# Altium footprint library PcbLib1.PcbLib: 335 footprints (part 6 of 22)
Each footprint in its own frame and in the unit in brackets; x right, y up, seen from the top. Pads: shape width x height; smd on the part's side, far side on the other; paste and mask are expansions set on the pad; w line width, h text height; cw(c..) or ccw(c..) is an arc to the next point about the centre after c.
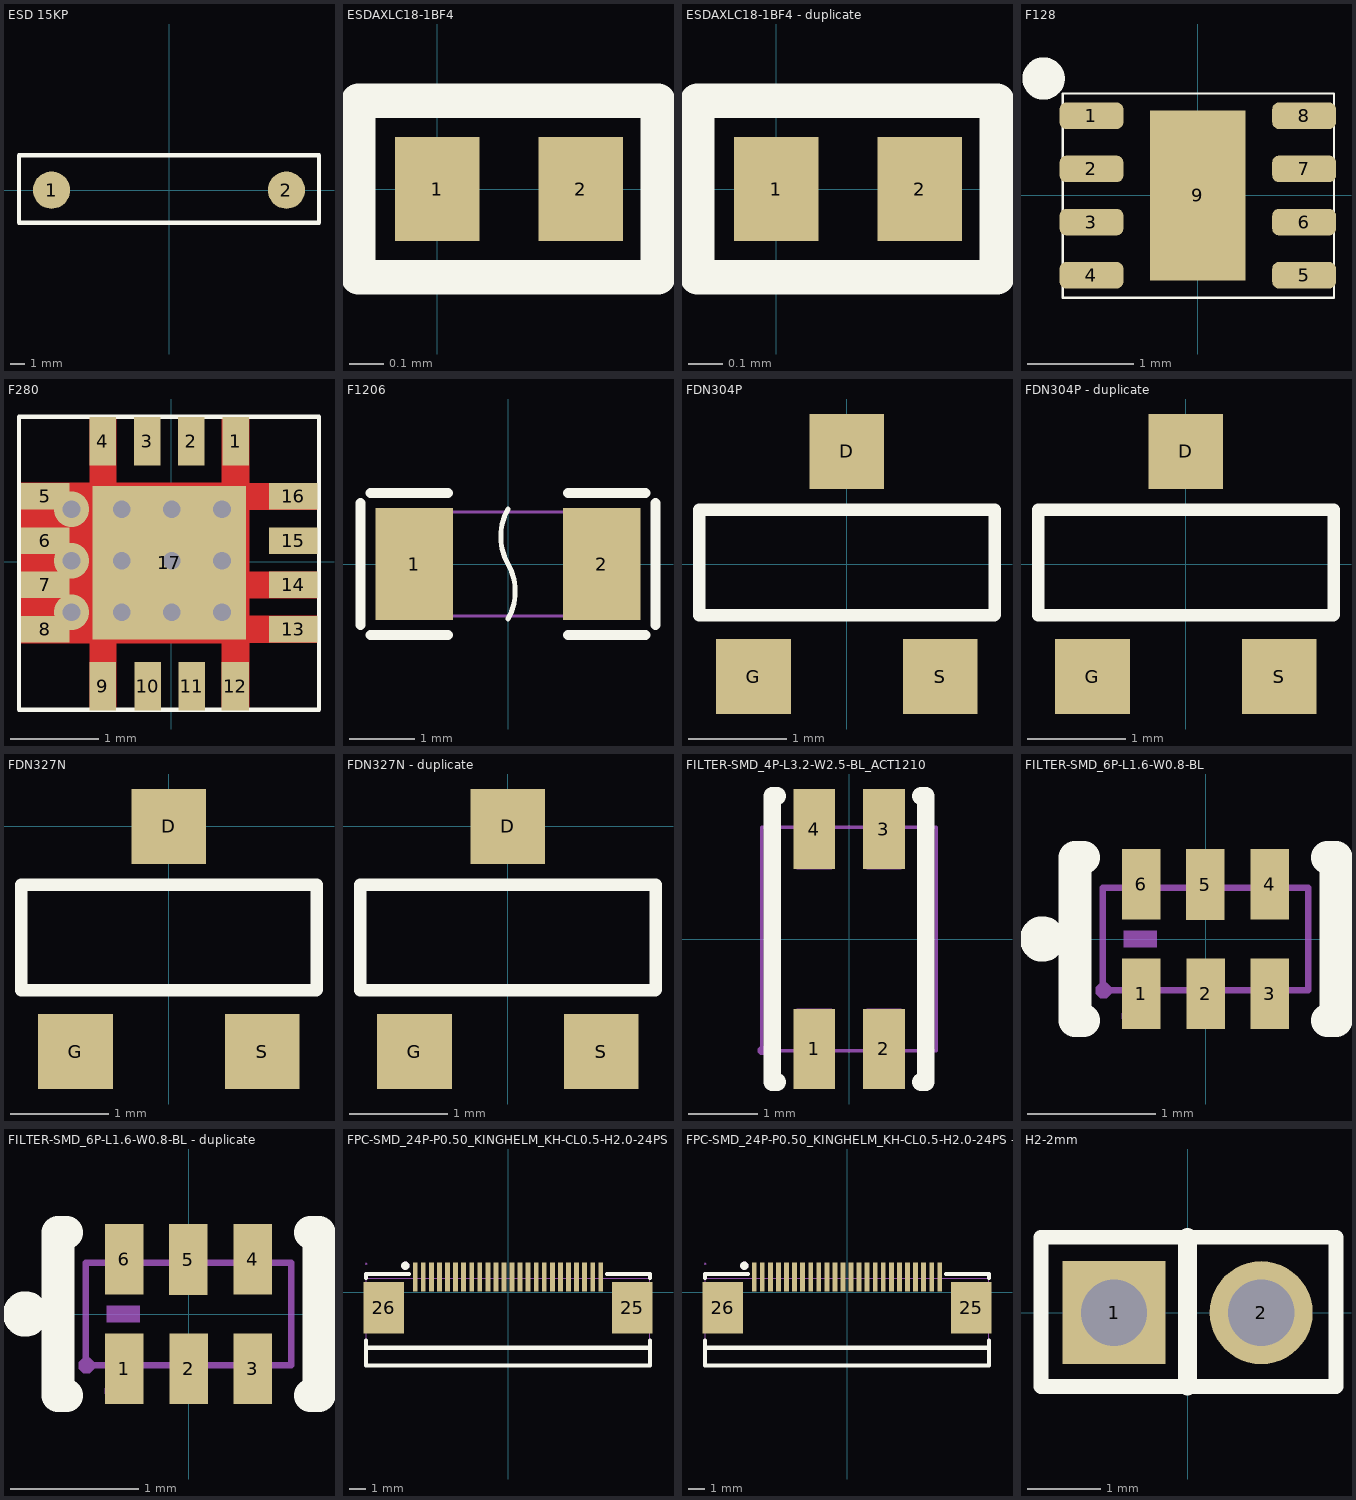
[diagram p5: the footprints below, top view; thin cyan lines are the x and y axes]

## ESD 15KP [mm]
pads (2):
  round 2.5 smd: 1(-7.875,0) 2(7.875,0)
Top Overlay:
  lines w0.3: -10.058,-2.184 -10.058,2.337 10.058,2.337 10.058,-2.184 -10.058,-2.184

## ESDAXLC18-1BF4 [mm]
pads (2):
  rect 0.243x0.3 smd: 1(0,0) 2(0.413,0)
Top Overlay:
  lines w0.1: -0.229,-0.254 -0.229,0.254 0.635,0.254 0.635,-0.254 -0.229,-0.254

## ESDAXLC18-1BF4 - duplicate [mm]
pads (2):
  rect 0.243x0.3 smd: 1(0,0) 2(0.413,0)
Top Overlay:
  lines w0.1: -0.229,-0.254 -0.229,0.254 0.635,0.254 0.635,-0.254 -0.229,-0.254

## F128 [mm]
pads (9):
  rrect50% 0.6x0.25 smd: 1(-1,0.75) 2(-1,0.25) 3(-1,-0.25) 4(-1,-0.75) 5(1,-0.75) 7(1,0.25) 8(1,0.75)
  rrect50% 0.6x0.25 smd mask+0.102: 6(1,-0.25)
  rect 0.9x1.6 smd mask+0.102: 9(0,0)
Top Overlay:
  circle w0.254: c-1.45,1.1 r0.072
  lines w0.02: -1.271,-0.962 1.281,-0.962 1.281,0.959 -1.271,0.959 -1.271,-0.962

## F280 [mm]
pads (17):
  rect 0.3x0.55 smd mask+0: 1(0.728,1.363) 2(0.228,1.363) 3(-0.272,1.363) 4(-0.772,1.363) 10(-0.265,-1.405) 11(0.235,-1.405)
  rect 0.55x0.3 smd mask+0: 5(-1.422,0.741) 6(-1.422,0.241) 7(-1.422,-0.259) 8(-1.422,-0.759) 13(1.378,-0.759) 14(1.378,-0.259) 15(1.378,0.241) 16(1.378,0.741)
  rect 0.3x0.55 smd mask+0.102: 9(-0.771,-1.405)
  rect 0.31x0.55 smd mask+0: 12(0.725,-1.405)
  rect 1.73x1.73 smd mask+0: 17(-0.022,-0.009)
via 0.574,0.594 diameter 0.4 hole 0.2
via 0.574,0.013 diameter 0.4 hole 0.2
via 0.574,-0.567 diameter 0.4 hole 0.2
via 0.008,0.594 diameter 0.4 hole 0.2
via 0.008,0.013 diameter 0.4 hole 0.2
via 0.008,-0.567 diameter 0.4 hole 0.2
via -0.559,0.594 diameter 0.4 hole 0.2
via -0.559,0.013 diameter 0.4 hole 0.2
via -0.559,-0.567 diameter 0.4 hole 0.2
via -1.126,0.594 diameter 0.4 hole 0.2
via -1.126,0.013 diameter 0.4 hole 0.2
via -1.126,-0.567 diameter 0.4 hole 0.2
Top Layer:
  region: 1.655,-0.913 1.655,-0.608 0.858,-0.608 0.858,-0.913
  region: 1.654,-0.409 1.654,-0.108 -0.143,-0.107 -0.143,-0.41
  region: -0.922,-1.684 -0.622,-1.684 -0.62,1.642 -0.922,1.642
  region: 0.574,-1.688 0.882,-1.688 0.884,1.642 0.574,1.642
  region: -1.697,-0.917 0.871,-0.917 0.872,0.893 -1.697,0.893
  region: 1.652,0.592 1.652,0.891 0.499,0.892 0.499,0.592
Top Overlay:
  lines w0.05: -1.719,-1.669 -1.719,1.642 1.67,1.642 1.67,-1.669 -1.719,-1.669

## F1206 [mm] "保险丝"
pads (2):
  rect 1.19x1.728 smd paste+0 mask+0.051: 1(-1.445,0) 2(1.445,0)
Top Overlay:
  lines w0.076: 0,-0.845 ccw(c-0.732,-0.422) 0,0 cw(c0.732,0.422) 0,0.845
  lines w0.152: -2.269,-0.94 -2.269,0.94 ; -2.116,-1.093 -0.926,-1.093 ; -2.116,1.093 -0.926,1.093 ; 0.926,-1.093 2.116,-1.093 ; 0.926,1.093 2.116,1.093 ; 2.269,-0.94 2.269,0.94
Mechanical 15:
  region: -1.54,-0.8 -1.54,-0.775 -1.575,-0.74 -1.625,-0.74 -1.66,-0.775 -1.66,-0.8 -1.66,-0.825 -1.625,-0.86 -1.575,-0.86 -1.54,-0.825 -1.54,-0.8
  region: -1.6,-0.8 -1.1,-0.8 -1.1,0.8 -1.6,0.8
  region: 1.1,-0.8 1.6,-0.8 1.6,0.8 1.1,0.8
  lines w0.051: -1.6,-0.8 1.6,-0.8 1.6,0.8 -1.6,0.8 -1.6,-0.8

## FDN304P [mm]
height 4.5
pads (3):
  rect 0.76x0.76 smd: D(0,1.145) G(-0.95,-1.145) S(0.95,-1.145)
Top Overlay:
  lines w0.127: 1.499,-0.521 -1.5,-0.521 -1.5,0.551 1.504,0.551 1.504,-0.517

## FDN304P - duplicate [mm]
height 4.5
pads (3):
  rect 0.76x0.76 smd: D(0,1.145) G(-0.95,-1.145) S(0.95,-1.145)
Top Overlay:
  lines w0.127: 1.499,-0.521 -1.5,-0.521 -1.5,0.551 1.504,0.551 1.504,-0.517

## FDN327N [mm]
pads (3):
  rect 0.76x0.76 smd: D(0,0) G(-0.95,-2.29) S(0.95,-2.29)
Top Overlay:
  lines w0.127: 1.499,-1.666 -1.5,-1.666 -1.5,-0.594 1.504,-0.594 1.504,-1.662

## FDN327N - duplicate [mm]
pads (3):
  rect 0.76x0.76 smd: D(0,0) G(-0.95,-2.29) S(0.95,-2.29)
Top Overlay:
  lines w0.127: 1.499,-1.666 -1.5,-1.666 -1.5,-0.594 1.504,-0.594 1.504,-1.662

## FILTER-SMD_4P-L3.2-W2.5-BL_ACT1210 [mm]
pads (4):
  rect 0.6x1.15 smd paste+0 mask+0.051: 1(-0.5,-1.575) 2(0.5,-1.575) 3(0.5,1.575) 4(-0.5,1.575)
Top Overlay:
  lines w0.254: -1.031,-2.05 -1.1,-2.05 -1.1,2.05 -1.031,2.05 ; 1.031,-2.05 1.1,-2.05 1.1,2.05 1.031,2.05
Mechanical 15:
  region: -1.19,-1.6 -1.19,-1.575 -1.225,-1.54 -1.275,-1.54 -1.31,-1.575 -1.31,-1.6 -1.31,-1.625 -1.275,-1.66 -1.225,-1.66 -1.19,-1.625 -1.19,-1.6
  region: -0.25,-1.6 -0.75,-1.6 -0.75,-1 -0.25,-1
  region: 0.75,-1.6 0.25,-1.6 0.25,-1 0.75,-1
  region: 0.75,1 0.25,1 0.25,1.6 0.75,1.6
  region: -0.25,1 -0.75,1 -0.75,1.6 -0.25,1.6
  lines w0.051: -1.25,-1.6 1.25,-1.6 1.25,1.6 -1.25,1.6 -1.25,-1.6

## FILTER-SMD_6P-L1.6-W0.8-BL [mm]
pads (6):
  rect 0.3x0.55 smd mask+0.051: 1(-0.5,-0.425) 2(0.002,-0.425) 3(0.5,-0.425) 4(0.5,0.425) 5(-0.001,0.424) 6(-0.5,0.425)
Top Overlay:
  circle w0.254: c-1.27,0 r0.05
  lines w0.254: -0.948,-0.635 -1.016,-0.635 -1.016,0.635 -0.948,0.635 ; 0.947,-0.635 1.016,-0.635 1.016,0.635 0.947,0.635
Mechanical 6:
  circle w0.1: c-0.554,-0.599 r0.05
  region: -0.635,0.064 -0.381,0.064 -0.381,-0.063 -0.635,-0.063
Mechanical 15:
  region: -0.735,-0.401 -0.735,-0.376 -0.77,-0.341 -0.82,-0.341 -0.855,-0.376 -0.855,-0.401 -0.855,-0.426 -0.82,-0.461 -0.77,-0.461 -0.735,-0.426 -0.735,-0.401
  region: -0.6,0.4 -0.4,0.4 -0.4,0.25 -0.6,0.25
  region: -0.101,0.4 0.099,0.4 0.099,0.25 -0.101,0.25
  region: 0.4,0.4 0.6,0.4 0.6,0.25 0.4,0.25
  region: 0.4,-0.25 0.6,-0.25 0.6,-0.4 0.4,-0.4
  region: -0.098,-0.25 0.102,-0.25 0.102,-0.4 -0.098,-0.4
  region: -0.6,-0.25 -0.4,-0.25 -0.4,-0.4 -0.6,-0.4
  lines w0.051: -0.8,-0.4 -0.8,0.4 0.8,0.4 0.8,-0.4 -0.8,-0.4

## FILTER-SMD_6P-L1.6-W0.8-BL - duplicate [mm]
pads (6):
  rect 0.3x0.55 smd mask+0.051: 1(-0.5,-0.425) 2(0.002,-0.425) 3(0.5,-0.425) 4(0.5,0.425) 5(-0.001,0.424) 6(-0.5,0.425)
Top Overlay:
  circle w0.254: c-1.27,0 r0.05
  lines w0.254: -0.948,-0.635 -1.016,-0.635 -1.016,0.635 -0.948,0.635 ; 0.947,-0.635 1.016,-0.635 1.016,0.635 0.947,0.635
Mechanical 6:
  circle w0.1: c-0.554,-0.599 r0.05
  region: -0.635,0.064 -0.381,0.064 -0.381,-0.063 -0.635,-0.063
Mechanical 15:
  region: -0.735,-0.401 -0.735,-0.376 -0.77,-0.341 -0.82,-0.341 -0.855,-0.376 -0.855,-0.401 -0.855,-0.426 -0.82,-0.461 -0.77,-0.461 -0.735,-0.426 -0.735,-0.401
  region: -0.6,0.4 -0.4,0.4 -0.4,0.25 -0.6,0.25
  region: -0.101,0.4 0.099,0.4 0.099,0.25 -0.101,0.25
  region: 0.4,0.4 0.6,0.4 0.6,0.25 0.4,0.25
  region: 0.4,-0.25 0.6,-0.25 0.6,-0.4 0.4,-0.4
  region: -0.098,-0.25 0.102,-0.25 0.102,-0.4 -0.098,-0.4
  region: -0.6,-0.25 -0.4,-0.25 -0.4,-0.4 -0.6,-0.4
  lines w0.051: -0.8,-0.4 -0.8,0.4 0.8,0.4 0.8,-0.4 -0.8,-0.4

## FPC-SMD_24P-P0.50_KINGHELM_KH-CL0.5-H2.0-24PS [mm]
pads (26):
  rect 0.3x1.8 smd mask+0.05: 1(-5.75,0.95) 2(-5.25,0.95) 3(-4.75,0.95) 4(-4.25,0.95) 5(-3.75,0.95) 6(-3.25,0.95) 7(-2.75,0.95) 8(-2.25,0.95) 9(-1.75,0.95) 10(-1.25,0.95) 11(-0.75,0.95) 12(-0.25,0.95) 13(0.25,0.95) 14(0.75,0.95) 15(1.25,0.95) 16(1.75,0.95) 17(2.25,0.95) 18(2.75,0.95) 19(3.25,0.95) 20(3.75,0.95) 21(4.25,0.95) 22(4.75,0.95) 23(5.25,0.95) 24(5.75,0.95)
  rect 2.5x3.2 smd mask+0.05: 25(7.7,-0.95) 26(-7.7,-0.95)
Top Overlay:
  circle w0.254: c-6.367,1.651 r0.127
  lines w0.254: -8.8,-4.541 -8.8,-3.441 ; -8.8,-2.981 -8.8,-3.441 ; -8.8,0.881 -8.8,1.143 -6.131,1.143 ; -8.763,-4.541 8.8,-4.541 8.8,-3.441 ; 6.131,1.143 8.8,1.143 ; 8.8,-2.981 8.8,-3.441 ; 8.8,0.881 8.8,1.077 ; -8.8,-3.441 8.8,-3.441
Mechanical 6:
  circle w0.254: c-6.367,1.651 r0.127
Mechanical 15:
  region: -8.74,1.759 -8.74,1.784 -8.775,1.819 -8.825,1.819 -8.86,1.784 -8.86,1.759 -8.86,1.734 -8.825,1.699 -8.775,1.699 -8.74,1.734 -8.74,1.759
  region: -5.65,0.759 -5.85,0.759 -5.85,1.759 -5.65,1.759
  region: -5.15,0.759 -5.35,0.759 -5.35,1.759 -5.15,1.759
  region: -4.65,0.759 -4.85,0.759 -4.85,1.759 -4.65,1.759
  region: -4.15,0.759 -4.35,0.759 -4.35,1.759 -4.15,1.759
  region: -3.65,0.759 -3.85,0.759 -3.85,1.759 -3.65,1.759
  region: -3.15,0.759 -3.35,0.759 -3.35,1.759 -3.15,1.759
  region: -2.65,0.759 -2.85,0.759 -2.85,1.759 -2.65,1.759
  region: -2.15,0.759 -2.35,0.759 -2.35,1.759 -2.15,1.759
  region: -1.65,0.759 -1.85,0.759 -1.85,1.759 -1.65,1.759
  region: -1.15,0.759 -1.35,0.759 -1.35,1.759 -1.15,1.759
  region: -0.65,0.759 -0.85,0.759 -0.85,1.759 -0.65,1.759
  region: -0.15,0.759 -0.35,0.759 -0.35,1.759 -0.15,1.759
  region: 0.35,0.759 0.15,0.759 0.15,1.759 0.35,1.759
  region: 0.85,0.759 0.65,0.759 0.65,1.759 0.85,1.759
  region: 1.35,0.759 1.15,0.759 1.15,1.759 1.35,1.759
  region: 1.85,0.759 1.65,0.759 1.65,1.759 1.85,1.759
  region: 2.35,0.759 2.15,0.759 2.15,1.759 2.35,1.759
  region: 2.85,0.759 2.65,0.759 2.65,1.759 2.85,1.759
  region: 3.35,0.759 3.15,0.759 3.15,1.759 3.35,1.759
  region: 3.85,0.759 3.65,0.759 3.65,1.759 3.85,1.759
  region: 4.35,0.759 4.15,0.759 4.15,1.759 4.35,1.759
  region: 4.85,0.759 4.65,0.759 4.65,1.759 4.85,1.759
  region: 5.35,0.759 5.15,0.759 5.15,1.759 5.35,1.759
  region: 5.85,0.759 5.65,0.759 5.65,1.759 5.85,1.759
  region: 8.625,-2.375 6.775,-2.375 6.775,0.475 8.625,0.475
  region: -6.775,-2.375 -8.625,-2.375 -8.625,0.475 -6.775,0.475
  lines w0.051: -8.8,-3.441 -8.8,0.859 8.8,0.859 8.8,-3.441 -8.8,-3.441

## FPC-SMD_24P-P0.50_KINGHELM_KH-CL0.5-H2.0-24PS - duplicate [mm]
pads (26):
  rect 0.3x1.8 smd mask+0.05: 1(-5.75,0.95) 2(-5.25,0.95) 3(-4.75,0.95) 4(-4.25,0.95) 5(-3.75,0.95) 6(-3.25,0.95) 7(-2.75,0.95) 8(-2.25,0.95) 9(-1.75,0.95) 10(-1.25,0.95) 11(-0.75,0.95) 12(-0.25,0.95) 13(0.25,0.95) 14(0.75,0.95) 15(1.25,0.95) 16(1.75,0.95) 17(2.25,0.95) 18(2.75,0.95) 19(3.25,0.95) 20(3.75,0.95) 21(4.25,0.95) 22(4.75,0.95) 23(5.25,0.95) 24(5.75,0.95)
  rect 2.5x3.2 smd mask+0.05: 25(7.7,-0.95) 26(-7.7,-0.95)
Top Overlay:
  circle w0.254: c-6.367,1.651 r0.127
  lines w0.254: -8.8,-4.541 -8.8,-3.441 ; -8.8,-2.981 -8.8,-3.441 ; -8.8,0.881 -8.8,1.143 -6.131,1.143 ; -8.763,-4.541 8.8,-4.541 8.8,-3.441 ; 6.131,1.143 8.8,1.143 ; 8.8,-2.981 8.8,-3.441 ; 8.8,0.881 8.8,1.077 ; -8.8,-3.441 8.8,-3.441
Mechanical 6:
  circle w0.254: c-6.367,1.651 r0.127
Mechanical 15:
  region: -8.74,1.759 -8.74,1.784 -8.775,1.819 -8.825,1.819 -8.86,1.784 -8.86,1.759 -8.86,1.734 -8.825,1.699 -8.775,1.699 -8.74,1.734 -8.74,1.759
  region: -5.65,0.759 -5.85,0.759 -5.85,1.759 -5.65,1.759
  region: -5.15,0.759 -5.35,0.759 -5.35,1.759 -5.15,1.759
  region: -4.65,0.759 -4.85,0.759 -4.85,1.759 -4.65,1.759
  region: -4.15,0.759 -4.35,0.759 -4.35,1.759 -4.15,1.759
  region: -3.65,0.759 -3.85,0.759 -3.85,1.759 -3.65,1.759
  region: -3.15,0.759 -3.35,0.759 -3.35,1.759 -3.15,1.759
  region: -2.65,0.759 -2.85,0.759 -2.85,1.759 -2.65,1.759
  region: -2.15,0.759 -2.35,0.759 -2.35,1.759 -2.15,1.759
  region: -1.65,0.759 -1.85,0.759 -1.85,1.759 -1.65,1.759
  region: -1.15,0.759 -1.35,0.759 -1.35,1.759 -1.15,1.759
  region: -0.65,0.759 -0.85,0.759 -0.85,1.759 -0.65,1.759
  region: -0.15,0.759 -0.35,0.759 -0.35,1.759 -0.15,1.759
  region: 0.35,0.759 0.15,0.759 0.15,1.759 0.35,1.759
  region: 0.85,0.759 0.65,0.759 0.65,1.759 0.85,1.759
  region: 1.35,0.759 1.15,0.759 1.15,1.759 1.35,1.759
  region: 1.85,0.759 1.65,0.759 1.65,1.759 1.85,1.759
  region: 2.35,0.759 2.15,0.759 2.15,1.759 2.35,1.759
  region: 2.85,0.759 2.65,0.759 2.65,1.759 2.85,1.759
  region: 3.35,0.759 3.15,0.759 3.15,1.759 3.35,1.759
  region: 3.85,0.759 3.65,0.759 3.65,1.759 3.85,1.759
  region: 4.35,0.759 4.15,0.759 4.15,1.759 4.35,1.759
  region: 4.85,0.759 4.65,0.759 4.65,1.759 4.85,1.759
  region: 5.35,0.759 5.15,0.759 5.15,1.759 5.35,1.759
  region: 5.85,0.759 5.65,0.759 5.65,1.759 5.85,1.759
  region: 8.625,-2.375 6.775,-2.375 6.775,0.475 8.625,0.475
  region: -6.775,-2.375 -8.625,-2.375 -8.625,0.475 -6.775,0.475
  lines w0.051: -8.8,-3.441 -8.8,0.859 8.8,0.859 8.8,-3.441 -8.8,-3.441

## H2-2mm [mm]
pads (2):
  rect 1.4x1.4 hole 0.9: 1(-1,0)
  round 1.4 hole 0.9: 2(1,0)
Top Overlay:
  lines w0.203: -1.991,-1 -1.991,1.025 2.016,1.025 2.016,-1 -1.991,-1
  lines w0.254: -0.002,-1 -0.002,1.025
Mechanical 6:
  lines w0.051: -2,-1 2,-1 2,1 -2,1 -2,-1
Mechanical 8:
  region: -1.94,-1 -1.94,-1.025 -1.975,-1.06 -2.025,-1.06 -2.06,-1.025 -2.06,-1 -2.06,-0.975 -2.025,-0.94 -1.975,-0.94 -1.94,-0.975 -1.94,-1
Mechanical 9:
  region: -1.25,0.25 -0.75,0.25 -0.75,-0.25 -1.25,-0.25
  region: 0.75,0.25 1.25,0.25 1.25,-0.25 0.75,-0.25